# Altium schematic symbol library FE.SchLib: 14 symbols
Pins are listed as number, name and electrical type; pins without a type are passive.

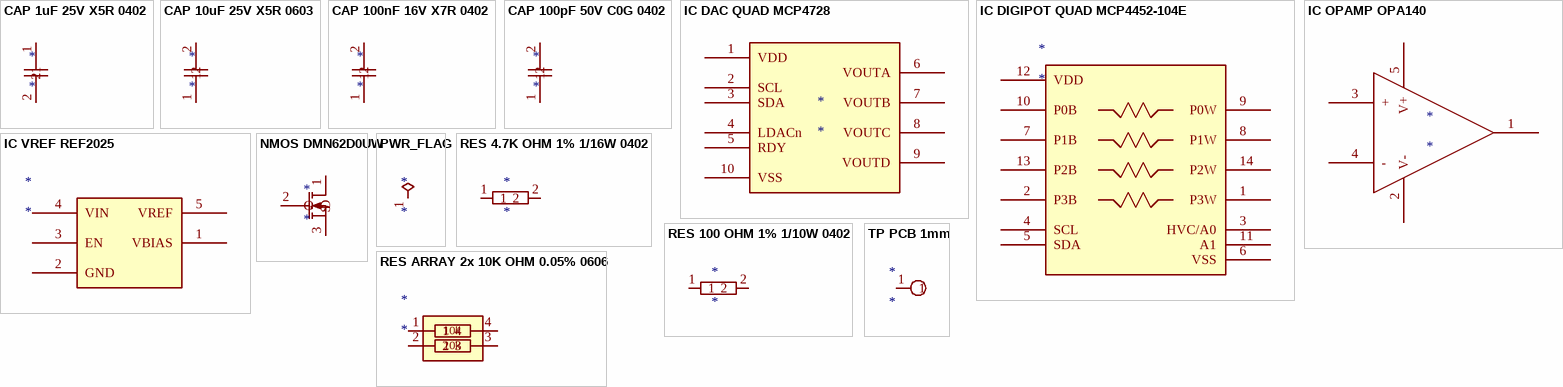
[diagram p0: symbols CAP 1uF 25V X5R 0402 to TP PCB 1mm]

## CAP 1uF 25V X5R 0402
designator *
pins: 1, 2

## CAP 10uF 25V X5R 0603
designator *
pins: 1, 2

## CAP 100nF 16V X7R 0402
designator *
pins: 1, 2

## CAP 100pF 50V C0G 0402
designator *
pins: 1, 2

## IC DAC QUAD MCP4728
designator *
pins: 1 VDD, 2 SCL, 3 SDA, 4 LDACn, 5 RDY, 6 VOUTA, 7 VOUTB, 8 VOUTC, 9 VOUTD, 10 VSS

## IC DIGIPOT QUAD MCP4452-104E
designator *
pins: 1 P3W, 2 P3B, 3 HVC/A0, 4 SCL, 5 SDA, 6 VSS, 7 P1B, 8 P1W, 9 P0W, 10 P0B, 11 A1, 12 VDD, 13 P2B, 14 P2W

## IC OPAMP OPA140
designator *
pins: 1 OUT, 2 V-, 3 +, 4 -, 5 V+

## IC VREF REF2025
designator *
pins: 1 VBIAS, 2 GND, 3 EN, 4 VIN, 5 VREF

## NMOS DMN62D0UW
designator *
pins: 1 D, 2 G, 3 S

## PWR_FLAG
designator *  (graphical)
pins: 1

## RES 4.7K OHM 1% 1/16W 0402
designator *
pins: 1, 2

## RES 100 OHM 1% 1/10W 0402
designator *
pins: 1, 2

## RES ARRAY 2x 10K OHM 0.05% 0606
designator *
pins: 1, 2, 3, 4
text: 10k

## TP PCB 1mm
designator *
pins: 1